# Altium footprint library MOD_DRV.PcbLib: 37 footprints (part 2 of 3)
Each footprint in its own frame and in the unit in brackets; x right, y up, seen from the top. Pads: shape width x height; smd on the part's side, far side on the other; paste and mask are expansions set on the pad; w line width, h text height; cw(c..) or ccw(c..) is an arc to the next point about the centre after c.
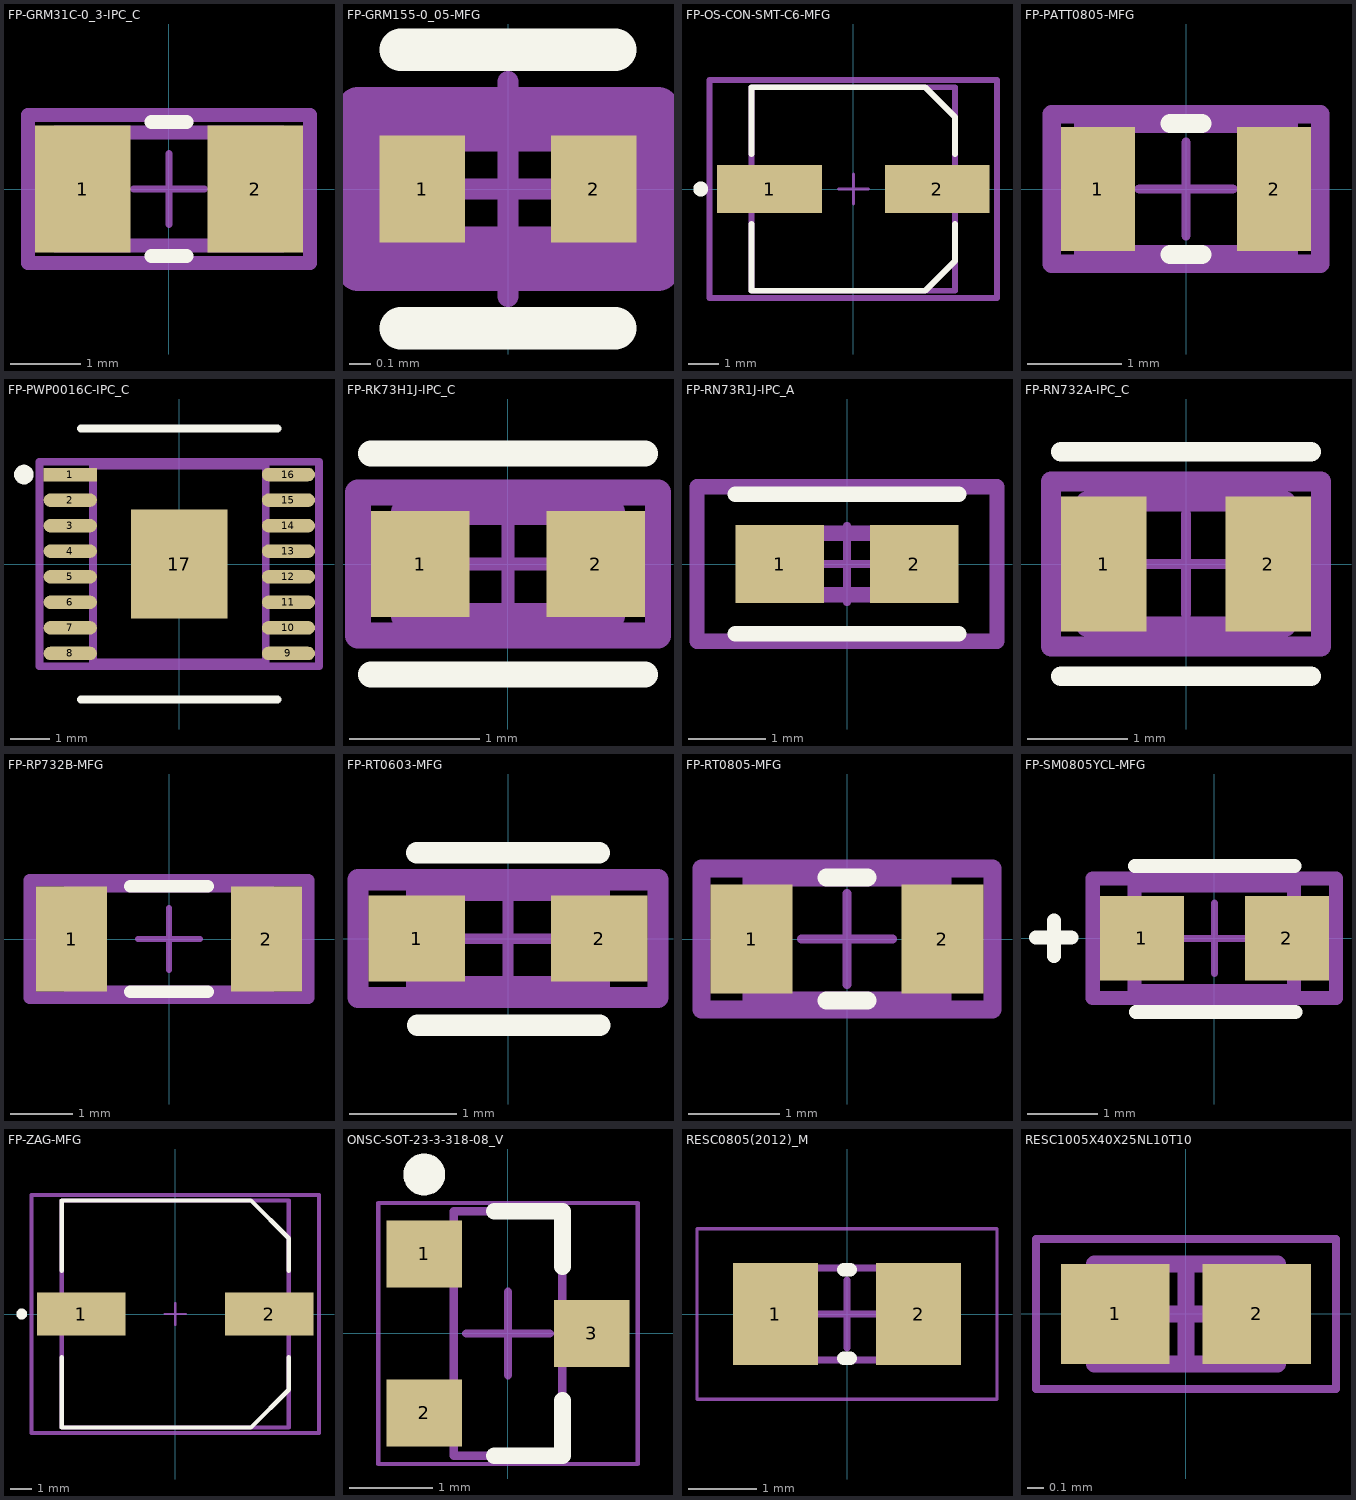
[diagram p1: the footprints below, top view; thin cyan lines are the x and y axes]

## FP-GRM31C-0_3-IPC_C [mm]
height 3.2
pads (2):
  rect 1.353x1.804 smd paste+0 mask+0: 1(-1.225,0) 2(1.225,0)
Top Overlay:
  lines w0.2: -0.249,-0.95 0.249,-0.95 ; -0.249,0.95 0.249,0.95
Top Assembly:
  lines w0.2: -2.002,-1.05 -2.002,1.05 2.002,1.05 2.002,-1.05 -2.002,-1.05
  text ".Designator" at 0,0.188 h1
Top 3D Body:
  lines w0.2: -1.6,-0.8 -1.6,0.8 1.6,0.8 1.6,-0.8 -1.6,-0.8
Top Courtyard:
  lines w0.2: -2.002,-1.05 -2.002,1.05 2.002,1.05 2.002,-1.05 -2.002,-1.05
Top Component Center:
  lines w0.1: -0.5,0 0.5,0 ; 0,-0.5 0,0.5
3D body "Cap_Murata_GRM31CC72A475KE11L_eec.STEP": height 0.25, standoff 0, extent -2.002,-1.05 2.002,1.05

## FP-GRM155-0_05-MFG [mm]
height 3.2
pads (2):
  rect 0.4x0.5 smd paste+0 mask+0: 1(-0.4,0) 2(0.4,0)
Top Overlay:
  lines w0.2: -0.5,-0.65 0.5,-0.65 ; -0.5,0.65 0.5,0.65
Top Assembly:
  lines w0.2: -0.7,-0.375 -0.7,0.375 0.7,0.375 0.7,-0.375 -0.7,-0.375
  text ".Designator" at 0,0.188 h1
Top 3D Body:
  lines w0.2: -0.525,-0.275 -0.525,0.275 0.525,0.275 0.525,-0.275 -0.525,-0.275
Top Courtyard:
  lines w0.2: -0.7,-0.375 -0.7,0.375 0.7,0.375 0.7,-0.375 -0.7,-0.375
Top Component Center:
  lines w0.1: -0.5,0 0.5,0 ; 0,-0.5 0,0.5
3D body "Cap_Murata_GRM1552C1H271GA01J_eec.STEP": height 0.25, standoff 0, extent -0.7,-0.375 0.7,0.375

## FP-OS-CON-SMT-C6-MFG [mm]
height 3.2
pads (2):
  rect 3.5x1.6 smd paste+0 mask+0: 1(-2.8,0) 2(2.8,0)
Top Overlay:
  circle w0.25: c-5.1,0 r0.125
  lines w0.2: -3.4,-1.175 -3.4,-3.4 2.4,-3.4 3.4,-2.4 3.4,-1.175 ; -3.4,1.175 -3.4,3.4 2.4,3.4 3.4,2.4 3.4,1.175
Top Assembly:
  lines w0.2: -4.8,-3.65 -4.8,3.65 4.8,3.65 4.8,-3.65 -4.8,-3.65
  text ".Designator" at 0,0.188 h1
Top 3D Body:
  lines w0.2: -3.4,-3.4 -3.4,3.4 3.4,3.4 3.4,-3.4 -3.4,-3.4
Top Courtyard:
  lines w0.2: -4.8,-3.65 -4.8,3.65 4.8,3.65 4.8,-3.65 -4.8,-3.65
Top Component Center:
  lines w0.1: -0.5,0 0.5,0 ; 0,-0.5 0,0.5
3D body "Cap_Panasonic_20SVPK150M_eec.STEP": height 6, standoff 0, extent -3.65,-3.3 3.65,3.3

## FP-PATT0805-MFG [mil]
height 125.98
pads (2):
  rect 31x52 smd paste+0 mask+0: 1(-37,0) 2(37,0)
Top Overlay:
  lines w7.87: -6.74,-27.5 6.74,-27.5 ; -6.74,27.5 6.74,27.5
Top Assembly:
  lines w7.87: -56.44,-31.44 -56.44,31.44 56.44,31.44 56.44,-31.44 -56.44,-31.44
  text ".Designator" at 0,7.39 h39.37
Top 3D Body:
  lines w7.87: -43,-27.5 -43,27.5 43,27.5 43,-27.5 -43,-27.5
Top Courtyard:
  lines w7.87: -56.44,-31.44 -56.44,31.44 56.44,31.44 56.44,-31.44 -56.44,-31.44
Top Component Center:
  lines w3.94: -19.68,0 19.68,0 ; 0,-19.68 0,19.68
3D body "Res_Vishay_PATT0805E1002BGT1_eec.STEP": height 10, standoff 0, extent -56.44,-31.44 56.44,31.44

## FP-PWP0016C-IPC_C [mm]
height 3.2
pads (17):
  rect 1.355x0.341 smd paste+0 mask+0: 1(-2.775,2.275)
  rrect100% 1.355x0.341 smd paste+0 mask+0: 2(-2.775,1.625) 3(-2.775,0.975) 4(-2.775,0.325) 5(-2.775,-0.325) 6(-2.775,-0.975) 7(-2.775,-1.625) 8(-2.775,-2.275) 9(2.775,-2.275) 10(2.775,-1.625) 11(2.775,-0.975) 12(2.775,-0.325) 13(2.775,0.325) 14(2.775,0.975) 15(2.775,1.625) 16(2.775,2.275)
  rect 2.46x2.77 smd paste-1000 mask+0: 17(0,0)
Top Overlay:
  circle w0.25: c-3.953,2.275 r0.125
  lines w0.2: -2.5,-3.45 2.5,-3.45 ; -2.5,3.45 2.5,3.45
Top Paste:
  rectangle: -0.752,-0.907 0.752,0.907
Top Assembly:
  lines w0.2: -3.553,-2.6 -3.553,2.6 3.553,2.6 3.553,-2.6 -3.553,-2.6
  text ".Designator" at 0,-0.001 h1
Top 3D Body:
  lines w0.2: -2.2,-2.5 -2.2,2.5 2.2,2.5 2.2,-2.5 -2.2,-2.5
Top Courtyard:
  lines w0.2: -3.553,-2.6 -3.553,2.6 3.553,2.6 3.553,-2.6 -3.553,-2.6
Top Component Center:
  lines w0.1: -0.5,0 0.5,0 ; 0,-0.5 0,0.5
3D body "IC_Texas_Instruments_DRV8876PWPR_eec.STEP": height 0.25, standoff 0, extent -3.553,-2.6 3.553,2.6

## FP-RK73H1J-IPC_C [mm]
height 3.2
pads (2):
  rect 0.756x0.812 smd paste+0 mask+0: 1(-0.675,0) 2(0.675,0)
Top Overlay:
  lines w0.2: -1.053,-0.85 1.053,-0.85 ; -1.053,0.85 1.053,0.85
Top Assembly:
  lines w0.2: -1.153,-0.55 -1.153,0.55 1.153,0.55 1.153,-0.55 -1.153,-0.55
  text ".Designator" at 0,0.188 h1
Top 3D Body:
  lines w0.2: -0.8,-0.4 -0.8,0.4 0.8,0.4 0.8,-0.4 -0.8,-0.4
Top Courtyard:
  lines w0.2: -1.153,-0.55 -1.153,0.55 1.153,0.55 1.153,-0.55 -1.153,-0.55
Top Component Center:
  lines w0.1: -0.5,0 0.5,0 ; 0,-0.5 0,0.5
3D body "Res_KOA_Speer_RK73H1JTTD1000F_eec.STEP": height 0.25, standoff 0, extent -1.153,-0.55 1.153,0.55

## FP-RN73R1J-IPC_A [mm]
height 3.2
pads (2):
  rect 1.156x1.012 smd paste+0 mask+0: 1(-0.875,0) 2(0.875,0)
Top Overlay:
  lines w0.2: -1.453,-0.906 1.453,-0.906 ; -1.453,0.906 1.453,0.906
Top Assembly:
  lines w0.2: -1.953,-1.006 -1.953,1.006 1.953,1.006 1.953,-1.006 -1.953,-1.006
  text ".Designator" at 0,0.188 h1
Top 3D Body:
  lines w0.2: -0.8,-0.4 -0.8,0.4 0.8,0.4 0.8,-0.4 -0.8,-0.4
Top Courtyard:
  lines w0.2: -1.953,-1.006 -1.953,1.006 1.953,1.006 1.953,-1.006 -1.953,-1.006
Top Component Center:
  lines w0.1: -0.5,0 0.5,0 ; 0,-0.5 0,0.5
3D body "Res_KOA_Speer_RN73R1JTTD2582B10_eec.STEP": height 0.25, standoff 0, extent -1.953,-1.006 1.953,1.006

## FP-RN732A-IPC_C [mil]
height 125.98
pads (2):
  rect 33.67x53.39 smd paste+0 mask+0: 1(-32.5,0) 2(32.5,0)
Top Overlay:
  lines w7.87: -49.33,-44.29 49.33,-44.29 ; -49.33,44.29 49.33,44.29
Top Assembly:
  lines w7.87: -53.27,-32.48 -53.27,32.48 53.27,32.48 53.27,-32.48 -53.27,-32.48
  text ".Designator" at 0,7.39 h39.37
Top 3D Body:
  lines w7.87: -39.37,-24.61 -39.37,24.61 39.37,24.61 39.37,-24.61 -39.37,-24.61
Top Courtyard:
  lines w7.87: -53.27,-32.48 -53.27,32.48 53.27,32.48 53.27,-32.48 -53.27,-32.48
Top Component Center:
  lines w3.94: -19.68,0 19.68,0 ; 0,-19.68 0,19.68
3D body "Res_KOA_Speer_RN732ATTD1012F10_eec.STEP": height 10, standoff 0, extent -53.27,-32.48 53.27,32.48

## FP-RP732B-MFG [mm]
height 3.2
pads (2):
  rect 1.15x1.7 smd paste+0 mask+0: 1(-1.575,0) 2(1.575,0)
Top Overlay:
  lines w0.2: -0.625,-0.85 0.625,-0.85 ; -0.625,0.85 0.625,0.85
Top Assembly:
  lines w0.2: -2.25,-0.95 -2.25,0.95 2.25,0.95 2.25,-0.95 -2.25,-0.95
  text ".Designator" at 0,0.188 h1
Top 3D Body:
  lines w0.2: -1.6,-0.85 -1.6,0.85 1.6,0.85 1.6,-0.85 -1.6,-0.85
Top Courtyard:
  lines w0.2: -2.25,-0.95 -2.25,0.95 2.25,0.95 2.25,-0.95 -2.25,-0.95
Top Component Center:
  lines w0.1: -0.5,0 0.5,0 ; 0,-0.5 0,0.5
3D body "Res_TE_Connectivity_RP73D2B30K9BTDF_eec.STEP": height 0.25, standoff 0, extent -2.25,-0.95 2.25,0.95

## FP-RT0603-MFG [mm]
height 3.2
pads (2):
  rect 0.9x0.8 smd paste+0 mask+0: 1(-0.85,0) 2(0.85,0)
Top Overlay:
  lines w0.2: -0.85,0.8 0.85,0.8 ; -0.845,-0.807 0.855,-0.807
Top Assembly:
  lines w0.2: -1.4,-0.55 -1.4,0.55 1.4,0.55 1.4,-0.55 -1.4,-0.55
  text ".Designator" at 0,0.188 h1
Top 3D Body:
  lines w0.2: -0.85,-0.45 -0.85,0.45 0.85,0.45 0.85,-0.45 -0.85,-0.45
Top Courtyard:
  lines w0.2: -1.4,-0.55 -1.4,0.55 1.4,0.55 1.4,-0.55 -1.4,-0.55
Top Component Center:
  lines w0.1: -0.5,0 0.5,0 ; 0,-0.5 0,0.5
3D body "Res_Yageo_RT0603CRE0724K3L_eec.STEP": height 0.25, standoff 0, extent -1.4,-0.55 1.4,0.55

## FP-RT0805-MFG [mm]
height 3.2
pads (2):
  rect 0.9x1.2 smd paste+0 mask+0: 1(-1.05,0) 2(1.05,0)
Top Overlay:
  lines w0.2: -0.225,-0.675 0.225,-0.675 ; -0.225,0.675 0.225,0.675
Top Assembly:
  lines w0.2: -1.6,-0.775 -1.6,0.775 1.6,0.775 1.6,-0.775 -1.6,-0.775
  text ".Designator" at 0,0.188 h1
Top 3D Body:
  lines w0.2: -1.05,-0.675 -1.05,0.675 1.05,0.675 1.05,-0.675 -1.05,-0.675
Top Courtyard:
  lines w0.2: -1.6,-0.775 -1.6,0.775 1.6,0.775 1.6,-0.775 -1.6,-0.775
Top Component Center:
  lines w0.1: -0.5,0 0.5,0 ; 0,-0.5 0,0.5
3D body "Res_Yageo_RT0805WRB07165RL_eec.STEP": height 0.25, standoff 0, extent -1.6,-0.775 1.6,0.775

## FP-SM0805YCL-MFG [mil]
height 125.98
pads (2):
  rect 47x47 smd paste+0 mask+0: 1(-40.5,0) 2(40.5,0)
Top Overlay:
  lines w7.87: -99.61,0.39 -79.92,0.39 ; -89.57,-9.84 -89.57,9.84 ; -44.29,40.35 44.69,40.35 ; -43.82,-41.14 45.16,-41.14
Top Assembly:
  lines w7.87: -67.94,-33.44 -67.94,33.44 67.94,33.44 67.94,-33.44 -67.94,-33.44
  text ".Designator" at 0,-0.02 h39.37
Top 3D Body:
  lines w7.87: -44.5,-29.5 -44.5,29.5 44.5,29.5 44.5,-29.5 -44.5,-29.5
Top Courtyard:
  lines w7.87: -67.94,-33.44 -67.94,33.44 67.94,33.44 67.94,-33.44 -67.94,-33.44
Top Component Center:
  lines w3.94: -19.68,0 19.68,0 ; 0,-19.68 0,19.68
3D body "Diode_Bivar_SM0805YCL_eec.STEP": height 10, standoff 0, extent -67.94,-33.44 67.94,33.44

## FP-ZAG-MFG [mm]
height 3.2
pads (2):
  rect 4.1x2 smd paste+0 mask+0: 1(-4.35,0) 2(4.35,0)
Top Overlay:
  circle w0.25: c-7.1,0 r0.125
  lines w0.2: -5.25,-2 -5.25,-5.25 3.5,-5.25 5.25,-3.5 5.25,-2 ; -5.25,2 -5.25,5.25 3.5,5.25 5.25,3.5 5.25,2
Top Assembly:
  lines w0.2: -6.65,-5.5 -6.65,5.5 6.65,5.5 6.65,-5.5 -6.65,-5.5
  text ".Designator" at 0,0.188 h1
Top 3D Body:
  lines w0.2: -5.25,-5.25 -5.25,5.25 5.25,5.25 5.25,-5.25 -5.25,-5.25
Top Courtyard:
  lines w0.2: -6.65,-5.5 -6.65,5.5 6.65,5.5 6.65,-5.5 -6.65,-5.5
Top Component Center:
  lines w0.1: -0.5,0 0.5,0 ; 0,-0.5 0,0.5
3D body "Cap_Panasonic_EEH-ZA1V221P_eec.STEP": height 0.25, standoff 0, extent -6.65,-5.5 6.65,5.5

## ONSC-SOT-23-3-318-08_V [mm] "SOT23, 3-Leads, Body 2.92x1.3mm, Pitch 0.95mm"
height 1.11
pads (3):
  rect 0.9x0.8 smd: 1(-1,0.95) 2(-1,-0.95) 3(1,0)
Top Overlay:
  circle w0.25: c-1,1.9 r0.125
  lines w0.2: -0.165,-1.46 0.65,-1.46 0.65,-0.8 ; -0.165,1.46 0.65,1.46 0.65,0.8
Top 3D Body:
  lines w0.1: -0.65,-1.46 -0.65,1.46 0.65,1.46 0.65,-1.46 -0.65,-1.46
Top Courtyard:
  lines w0.05: -1.55,-1.56 -1.55,1.56 1.55,1.56 1.55,-1.56 -1.55,-1.56
  lines w0.1: -0.5,0 0.5,0 ; 0,-0.5 0,0.5
3D body: height 1.11, standoff 0.01, extent -0.65,-1.46 0.65,1.46

## RESC0805(2012)_M [mm] "Chip Resistor, Body 2.0x1.3mm, IPC Low Density"
height 0.7
pads (2):
  rect 1.25x1.5 smd: 1(-1.05,0) 2(1.05,0)
Top Overlay:
  lines w0.2: -0.05,-0.65 0.05,-0.65 ; -0.05,0.65 0.05,0.65
Top 3D Body:
  lines w0.1: -1.1,-0.675 -1.1,0.675 1.1,0.675 1.1,-0.675 -1.1,-0.675
Top Courtyard:
  lines w0.05: -2.2,-1.25 -2.2,1.25 2.2,1.25 2.2,-1.25 -2.2,-1.25
  lines w0.1: -0.5,0 0.5,0 ; 0,-0.5 0,0.5
3D body: height 0.7, standoff 0, extent -1.1,-0.675 -0.68,0.675
3D body: height 0.7, standoff 0, extent -0.68,-0.675 0.68,0.675
3D body: height 0.7, standoff 0, extent 0.68,-0.675 1.1,0.675

## RESC1005X40X25NL10T10 [mm] "Chip Resistor, 2-Leads, Body 1.00x0.50mm, IPC Medium Density"
height 0.4
pads (2):
  rect 0.65x0.6 smd: 1(-0.425,0) 2(0.425,0)
Top 3D Body:
  lines w0.1: -0.55,-0.3 -0.55,0.3 0.55,0.3 0.55,-0.3 -0.55,-0.3
Top Courtyard:
  lines w0.05: -0.9,-0.45 -0.9,0.45 0.9,0.45 0.9,-0.45 -0.9,-0.45
  lines w0.1: -0.3,0 0.3,0 ; 0,-0.3 0,0.3
3D body: height 0.4, standoff 0, extent -0.3,-0.3 0.3,0.3
3D body: height 0.4, standoff 0, extent -0.55,-0.3 -0.3,0.3
3D body: height 0.4, standoff 0, extent 0.3,-0.3 0.55,0.3